# Altium schematic symbol library Schlib1_Symbols.SchLib: 3 symbols
Pins are listed as number, name and electrical type; pins without a type are passive.

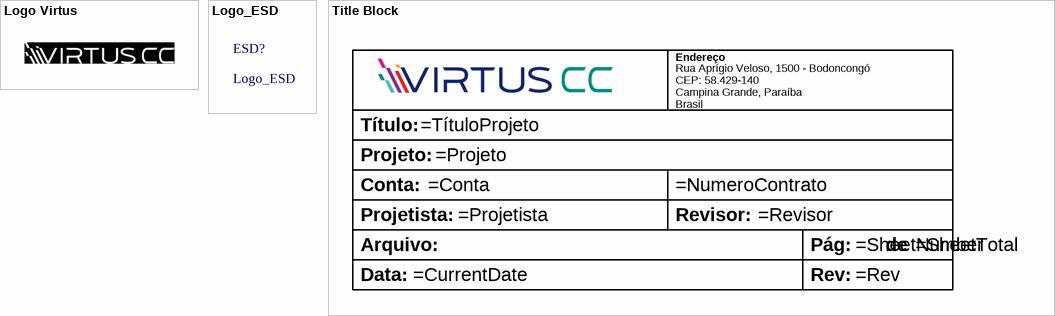
[diagram p0: symbols Logo Virtus to Title Block]

## Logo Virtus
designator LG?  (value not drawn)
footprint Logo Virtus CC

## Logo_ESD
designator ESD?  (graphical)

## Title Block
designator TB?  (value not drawn)  (graphical)
text: Endereço; Título:; Rua Aprígio Veloso, 1500 - Bodoncongó / CEP: 58.429-140 / Campina Grande, Paraíba / Brasil; Projeto:; Conta:; Projetista:; Revisor:; Arquivo:; Pág:; de; Data:; Rev: